# Altium integrated library altium.IntLib: 286 symbols (part 3 of 4)
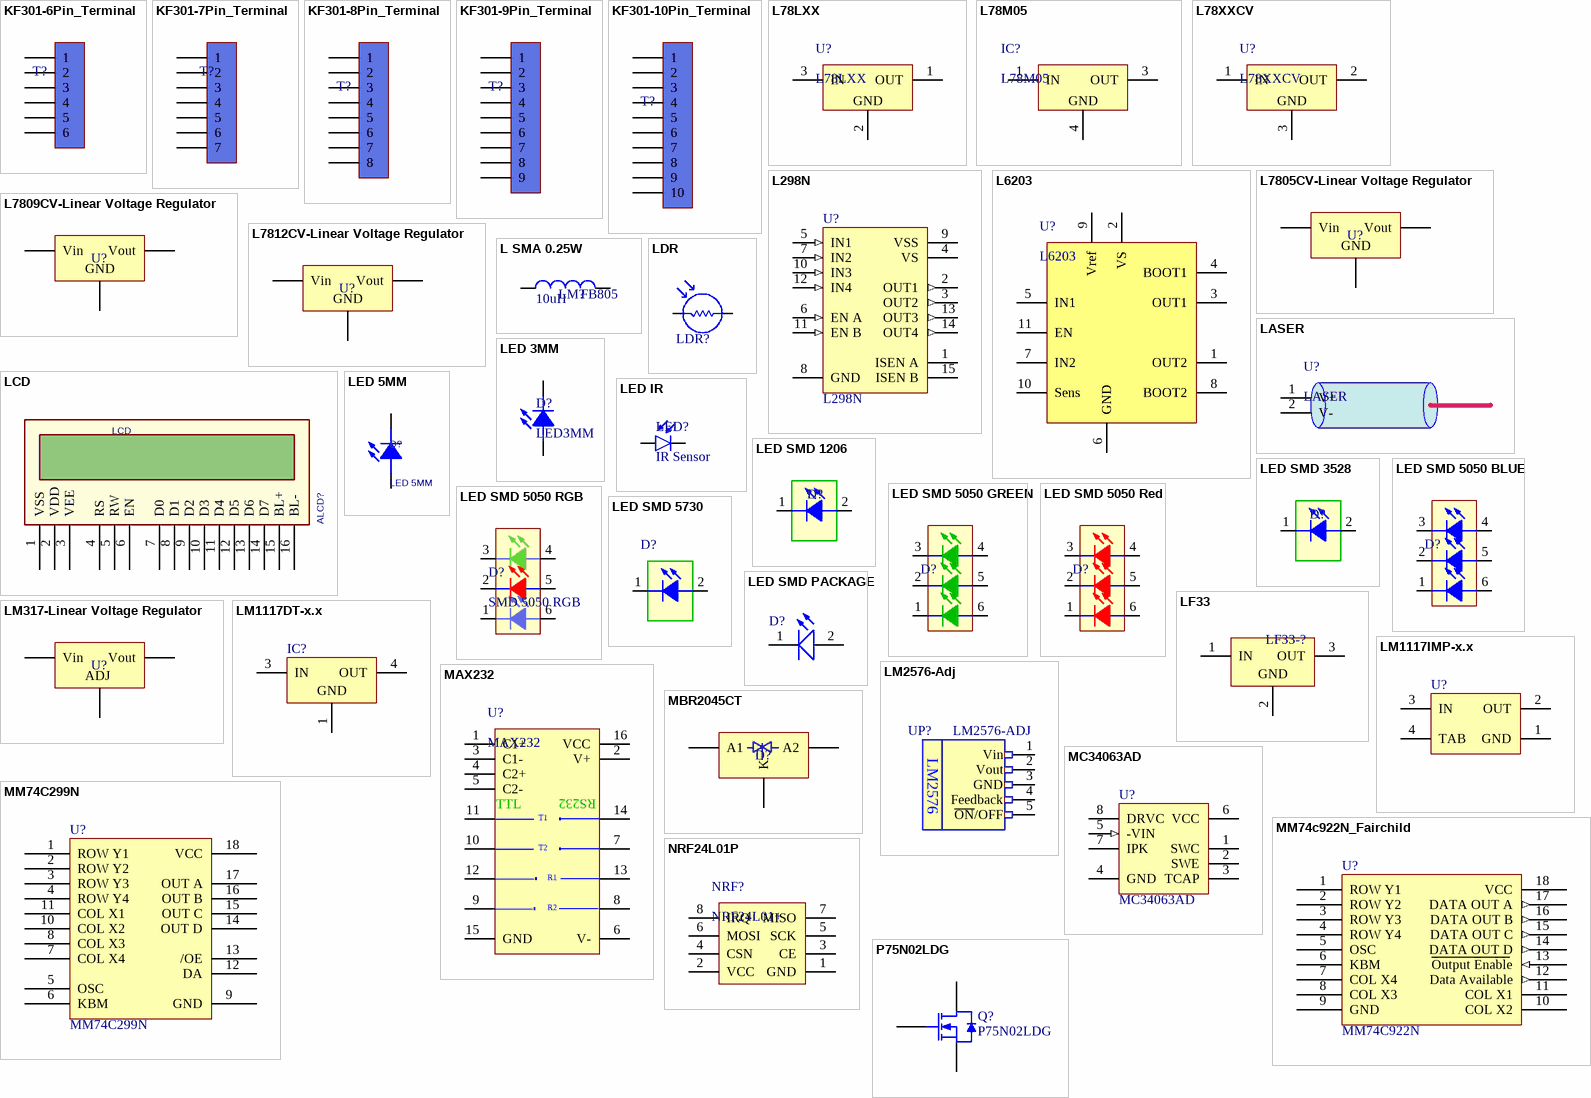
[diagram p9: symbols KF301-6Pin_Terminal to P75N02LDG]

## L78XXCV
designator U?
Fixed Voltage Regulator; Designer: Saeid Jorablo; Company: ControTec; Adding Date: 1387/01/06; Voltage: *
footprint 78XXCV - Right (Right Angle)
footprint 78XXCV
pins: 1 IN, 2 OUT, 3 GND

## L298N
designator U?
Dual Full Bridge Driver; Revision 1: 24-Aug-2001: Footprint Added.; Revision 2: 17-Jul-2002: Re-released for DXP Platform.; Package Information: Latest Revision: Apr-1998; Published: 8-Jun-2000; Datasheet: Latest Revision: Jul-1999; Package Reference: Multiwatt15H; Publisher: Altium Limited
footprint Multiwatt15H (TO, Thru-Hole, Horizontal, Heatsink Mounted; 15 Bent Staggered Leads; Pitch 1.27 mm)
footprint Multiwatt15V (TO, Thru-Hole, Vertical, Heatsink Mounted; 15 Bent Staggered Leads; Pitch 1.27 mm)
pins: 1 ISEN A, 2 OUT1 (out), 3 OUT2 (out), 4 VS (power), 5 IN1 (in), 6 EN A (in), 7 IN2 (in), 8 GND (power), 9 VSS (power), 10 IN3 (in), 11 EN B (in), 12 IN4 (in), 13 OUT3 (out), 14 OUT4 (out), 15 ISEN B

## L6203
designator U?
DMOS FULL BRIDGE DRIVER; Designer: Saeid Jorablo; Company: ControTEK; Adding Date: 1387/01/08
footprint MUlTIWATT11 (Use For L6203)
pins: 1 OUT2, 2 VS, 3 OUT1, 4 BOOT1, 5 IN1, 6 GND, 7 IN2, 8 BOOT2, 9 Vref, 10 Sens, 11 EN

## L7805CV-Linear Voltage Regulator
designator U?, comment L7805CV  (value not drawn)
Linear Voltage Regulator IC Positive FIXED Output 5V 1.5A TO-220AB; Manufacturer: STMicroelectronics; Designer: Abbas Basereh; Link: https://www.aliexpress.com/item/; Link: http://www.tme.eu/en/; Link: http://www.digikey.com/; Part. No: L7805CV
footprint TO-220 AB WITH HEAT SINK (Epoxy meets UL94, V0)
footprint TO-220 AB (Epoxy meets UL94, V0)
footprint TO-220 AB S (Epoxy meets UL94, V0)
footprint TO-220 AB WITH HEAT SINK ASM
footprint TO-220 AB with heatsink ya25 (Epoxy meets UL94, V0-Design:Abbas Basereh)
pins: 1 Vin, 2 GND, 3 Vout

## L7809CV-Linear Voltage Regulator
designator U?, comment L7809CV  (value not drawn)
Linear Voltage Regulator IC Positive FIXED Output 5V 1.5A TO-220AB; Manufacturer: STMicroelectronics; Designer: Abbas Basereh; Link: https://www.aliexpress.com/item/; Link: http://www.tme.eu/en/; Link: http://www.digikey.com/; Part. No: L7809CV
footprint TO-220 AB WITH HEAT SINK (Epoxy meets UL94, V0)
footprint TO-220 AB (Epoxy meets UL94, V0)
footprint TO-220 AB S (Epoxy meets UL94, V0)
footprint TO-220 AB WITH HEAT SINK ASM
footprint TO-220 AB with heatsink ya25 (Epoxy meets UL94, V0-Design:Abbas Basereh)
pins: 1 Vin, 2 GND, 3 Vout

## L7812CV-Linear Voltage Regulator
designator U?, comment L7812CV  (value not drawn)
Linear Voltage Regulator IC Positive FIXED Output 5V 1.5A TO-220AB; Manufacturer: STMicroelectronics; Designer: Abbas Basereh; Link: https://www.aliexpress.com/item/; Link: http://www.tme.eu/en/; Link: http://www.digikey.com/; Part. No: L7812CV
footprint TO-220 AB WITH HEAT SINK (Epoxy meets UL94, V0)
footprint TO-220 AB (Epoxy meets UL94, V0)
footprint TO-220 AB S (Epoxy meets UL94, V0)
footprint TO-220 AB WITH HEAT SINK ASM
footprint TO-220 AB with heatsink ya25 (Epoxy meets UL94, V0-Design:Abbas Basereh)
pins: 1 Vin, 2 GND, 3 Vout

## L SMA 0.25W
designator LM?, comment 10uH  value FB805
Inductor; Code_IEC: 1005; Published: 8-Jun-2000; LatestRevisionDate: 29-May-2009; LatestRevisionNote: IPC-7351 Footprint Added.; PackageReference: 0402-A; Publisher: Altium Limited; PackageDescription: Chip Inductor; Code_JEITA: 0402
footprint 0805L (,0805, 2012, 200X130)
pins: 1, 2

## LASER
designator U?
Designer: Saeid Jorablo; Company: Personal; Project Name: Abtahi; Adding Date: 10/21/2009; Wave Lenght: *; Power: *; Voltage: *
footprint Laser
pins: 1 V+, 2 V-

## LCD
designator ALCD?
Alphanumic LCD; Designer: Abbas Basereh; Data: 16-12-2016
footprint LCD_2X16 (LCD 2x16 Alphanumberic-Designer Abbas Basereh)
footprint LCD_2X16 BLUE10mm (LCD 2x16 Alphanumberic-Designer Abbas Basereh)
footprint LCD_2X16 BLUE - 2.5mm (LCD 2x16 Alphanumberic-Designer Abbas Basereh)
footprint LCD_2X16 GREEN10mm (LCD 2x16 Alphanumberic-Designer Abbas Basereh)
footprint LCD_2X16 GREEN - 2.5mm (LCD 2x16 Alphanumberic-Designer Abbas Basereh)
footprint LCD 16x2 (Character LCD, 2 Row, 16 Colunm)
footprint LCD 20X4 (4 line x 20 characters LCD)
pins: 1 VSS, 2 VDD, 3 VEE, 4 RS, 5 RW, 6 EN, 7 D0, 8 D1, 9 D2, 10 D3, 11 D4, 12 D5, 13 D6, 14 D7, 15 BL+, 16 BL-

## LDR
designator LDR?, comment PhotoCell  (value not drawn)
Photo Cell- Variable Resistor With Light; Company: IPA CO.; Designer: Saeid Jorablo; Last Update Time: 2008/07/17
footprint PhotoCell
pins: 1, 2

## LED 3MM
designator D?, comment LED3MM
Light Emitting Diode; Designer: Ali Hafizi
footprint LED3mm_GRN
footprint LEDRight_Green (LED 3mm Right Angle - Color Green)
footprint LEDRight_Red (LED 3mm Right Angle - Color Red)
footprint LEDRight_Yellow (LED 3mm Right Angle - Color Yellow)
pins: 1 ANODE, 2 CATHODE

## LED 5MM
designator D?
Light Emitting Diode; Designer: Abbas Basereh; Data: 16-12-2016; Link: *; Part.No: *
footprint LED5MM_BLUE (LED 5MM THROUGH HOLE BLUE-Designer Abbas Basereh)
footprint LED5MM_GRN (LED 5MM THROUGH HOLE GREEN-Designer Abbas Basereh)
footprint LED5MM_RED (LED 5MM THROUGH HOLE RED-Designer Abbas Basereh)
footprint LED5MM_YELLOW (LED 5MM THROUGH HOLE YELLOW-Designer Abbas Basereh)
pins: 1 ANODE, 2 CATHODE

## LED IR
designator LED?, comment IR Sensor
Infra Red Reciever Photo Diode; Designer: Saeid Jorablo; Organazation: ControTec; Adding Date: 1387/12/22
footprint LED5mm_IR_Reciver
footprint LED5mm_IR
pins: 1 A, 2 K

## LED SMD 1206
designator D?, comment SMD 1206 LED  (value not drawn)
footprint LED 1206
pins: 1, 2

## LED SMD 3528
designator D?  (value not drawn)
SMD 3528 LED
footprint LED 3528
pins: 1, 2

## LED SMD 5050 BLUE
designator D?, comment probably led colors not mach to real please check the device and change the component  (value not drawn)
SMD 5050 BLUE LED; Designer: Abbas Basereh; Design Date: 1395/11/10; ComponentLink1Description: SMD 5050 BLUE; ComponentLink1URL: http://www.yuanlei-led.com; ComponentLink2Description: Reference; PackageDescription: SMD 5050 BLUE; Publisher: Abbas Basereh; Mounting Technology: Surface Mount; Pin Count: 6; Status: Unreleased; Comment_1: SMD 5050 BLUE
footprint 5050 LED package (DESIGNER ABBAS BASEREH)
pins: 1, 2, 3, 4, 5, 6

## LED SMD 5050 GREEN
designator D?, comment probably led colors not mach to real please check the device and change the component  (value not drawn)
SMD 5050 GREEN LED; Designer: Abbas Basereh; Design Date: 1395/11/10; ComponentLink1Description: SMD 5050 GREEN; ComponentLink1URL: http://www.yuanlei-led.com; ComponentLink2Description: Reference; PackageDescription: SMD 5050 GREEN; Publisher: Abbas Basereh; Mounting Technology: Surface Mount; Pin Count: 6; Status: Unreleased; Comment_1: SMD 5050 GREEN
footprint 5050 LED package (DESIGNER ABBAS BASEREH)
pins: 1, 2, 3, 4, 5, 6

## LED SMD 5050 Red
designator D?, comment probably led colors not mach to real please check the device and change the component  (value not drawn)
SMD 5050 Red LED; Designer: Abbas Basereh; Design Date: 1395/11/10; ComponentLink1Description: SMD 5050 Red; ComponentLink1URL: http://www.yuanlei-led.com; ComponentLink2Description: Reference; PackageDescription: SMD 5050 Red; Publisher: Abbas Basereh; Mounting Technology: Surface Mount; Pin Count: 6; Status: Unreleased; Comment_1: SMD 5050 Red
footprint 5050 LED package (DESIGNER ABBAS BASEREH)
pins: 1, 2, 3, 4, 5, 6

## LED SMD 5050 RGB
designator D?, comment Comment_1: SMD 5050 RGB  (hidden comment: probably led colors not mach to real please check the device and change the component)
SMD 5050 RGB LED; Designer: Abbas Basereh; Design Date: 1395/11/10; ComponentLink1Description: SMD 5050 RGB; ComponentLink1URL: http://www.yuanlei-led.com; ComponentLink2Description: Reference; PackageDescription: SMD 5050 RGB; Publisher: Abbas Basereh; Mounting Technology: Surface Mount; HelpURL: probably color of the leds not mached real please check and change; Pin Count: 6; Status: Unreleased
footprint 5050 LED package (DESIGNER ABBAS BASEREH)
pins: 1, 2, 3, 4, 5, 6

## LED SMD 5730
designator D?, comment 0.5WATT WITHE/WARM  (value not drawn)
LED SMD 0.5WATT; Designer: Abbas Basereh; Comment_1: POWER LED SMD 0.5W; Design Date: 1395/11/14; ComponentLink1Description: POWER LED SMD LIGHTING; ComponentLink1URL: http://www.epistar.com.tw/_english/10_technology/00_detail.php?TID=3; ComponentLink2Description: Reference; PackageDescription: SMD; Publisher: Abbas Basereh; Mounting Technology: Surface Mount; Pin Count: 2; Status: Unreleased; VALUE: 0.5WATT WITHE/WARM
footprint LED-5730 (LED; 2 Leads)
pins: 1, 2

## LED SMD PACKAGE
designator D?
SMD Mono-color Chip LED Waterclear; Part Number: 150080BS75000; Peak Wavelength: 465 nm; Forward Voltage: 3.2 V; Published Date: Jan 2017; Publisher: Ali Hafizi
footprint LED_SMD_0603 (SMD Mono-color Chip LED, body 1.6x0.8mm)
footprint LED_SMD_0805 (SMD Mono-color Chip LED, body 2.0x1.25mm)
footprint LED_SMD_1206 (SMD Mono-color Chip LED, body 3.2x1.6mm)
pins: 1 K, 2 A

## LF33
designator LF33-?, comment Voltage Regulator  (value not drawn)
Voltage Regulator 3.3 Volt
footprint LF33 (Voltage Regulator 3.3)
pins: 1 IN, 2 GND, 3 OUT

## LM317-Linear Voltage Regulator
designator U?, comment LM317  (value not drawn)
Linear Voltage Regulator IC Positive Adjustable Output 1.2 V ~ 37 V 1.5A TO-220AB; Manufacturer: STMicroelectronics; Part. No: LM317T; Designer: Abbas Basereh; Link: https://www.aliexpress.com/item/10pcs-LM317T-LM317-1-5A-Adj-Voltage-Reg-IC-TO-220/32346665410.html?spm=2114.01010208.3.1.kAAILy&ws_ab_test=searchweb0_0,searchweb201602_4_10065_10068_10084_10083_10080_10082_10081_10060_10061_10062_10056_10055_10054_10059_10099_10078_10079_427_10073_10103_10102_10096_10052_10050_10051,searchweb201603_4&btsid=df845f6f-cd6f-40ae-85f4-c652e8570ab0; Link: http://www.tme.eu/en/details/lm317t/regulated-voltage-regulators/st-microelectronics/; Link: http://www.digikey.com/product-detail/en/stmicroelectronics/LM317T/497-1575-5-ND/591677
footprint TO-220 AB WITH HEAT SINK (Epoxy meets UL94, V0)
footprint TO-220 AB (Epoxy meets UL94, V0)
footprint TO-220 AB S (Epoxy meets UL94, V0)
footprint TO-220 AB WITH HEAT SINK ASM
footprint TO-220 AB with heatsink ya25 (Epoxy meets UL94, V0-Design:Abbas Basereh)
pins: 1 ADJ, 2 Vout, 3 Vin

## LM1117DT-x.x
designator IC?
x.x Volt, 800mA Low-Dropout Linear Regulator, 3-pin TO-252; PartNumber: LM1117DT-3.3; Manufacturer: National Semiconductor; PackageTopMarking: NSUZXYTT*LM1117*DT-X.X; PowerWise: N; CompType: LDO IC; DatasheetVersion: Apr-2006; PackageVersion: revD, Feb-2009; PackageReference: TD03B; PackageDescription: TO252, Molded, Jedec, 6.8 x 6.10 x 2.30mm Body, 3 Lead, 2.28mm Pitch, Surface Mount; Supplier 1: Farnell; Supplier 2: Farnell; RoHS: N; PinCount: 3; Code_JEDEC: TO-252-AA; ComponentLink1Description: LM1117 Datasheet; ComponentLink1URL: http://www.national.com/ds/LM/LM1117.pdf; ComponentLink2Description: LM1117 Web Page; ComponentLink2URL: http://www.national.com/pf/LM/LM1117.html; ComponentLink3Description: TD03B Package Page; ComponentLink3URL: http://www.national.com/packaging/folders/td03b.html
footprint TD03B_N (D-PAK, 4-Leads, Body 6.1x6.6mm, Pitch 2.29mm, Lead Span 9.7mm, IPC Medium Density)
footprint TD03B_L (D-PAK, 4-Leads, Body 6.1x6.6mm, Pitch 2.29mm, Lead Span 9.7mm, IPC High Density)
footprint TD03B_M (D-PAK, 4-Leads, Body 6.1x6.6mm, Pitch 2.29mm, Lead Span 9.7mm, IPC Low Density)
pins: 1 GND (power), 3 IN (power), 4 OUT (power)

## LM1117IMP-x.x
designator U?
x.x Volt, 800mA Low-Dropout Linear Regulator, 4-pin SOT-223; PartNumber: LM1117IMP-3.3; Manufacturer: National Semiconductor; PackageTopMarking: XYTT*N05B; PowerWise: N; CompType: LDO IC; Published: 4-Dec-2008; DatasheetVersion: Apr-2006; PackageVersion: revB, Apr-2003; PackageReference: MP04A; Publisher: Altium Limited; PackageDescription: Molded SOT-223, 6.50 x 3.56 x 1.6mm Body, 4 Lead, 2.3mm Pitch; Supplier 1: Farnell; Supplier Part Number 1: 7614123; RoHS: N; PinCount: 4; Code_JEDEC: TO-261-AA; Code_IPC: SOT223-4; ComponentLink1Description: LM1117 Datasheet; ComponentLink1URL: http://www.national.com/ds/LM/LM1117.pdf; ComponentLink2Description: LM1117 Web Page; ComponentLink2URL: http://www.national.com/pf/LM/LM1117.html; ComponentLink3Description: MP04A Package Page; ComponentLink3URL: http://www.national.com/packaging/folders/mp04a.html
footprint SOT223_N (SOT223, 4-Leads, Body 6.5x3.5mm, Pitch 2.3mm, Lead Span 7mm, IPC Medium Density)
footprint SOT223_L (SOT223, 4-Leads, Body 6.5x3.5mm, Pitch 2.3mm, Lead Span 7mm, IPC High Density)
footprint SOT223_M (SOT223, 4-Leads, Body 6.5x3.5mm, Pitch 2.3mm, Lead Span 7mm, IPC Low Density)
pins: 1 GND (power), 2 OUT (power), 3 IN (power), 4 TAB (power)

## LM2576-Adj
designator UP?, comment LM2576-ADJ
1.2-50V, 3A variable output step-down switching voltage regulator; Designer: Abbas Basereh; Data: 16-12-2016; Link: *; Part.No: *; VALUE: LM2576-ADJ
footprint TO-220_5 with heatsink (TO-220 STRAIGHT, T05A pitch: 1.7mm-Designer Abbas Basereh)
footprint TO-220_5 with heatsink HS sot32 (TO-220 STRAIGHT, T05A pitch: 1.7mm-Designer Abbas Basereh)
footprint TO-220_5 (TO-220 STRAIGHT, T05A pitch: 1.7mm-Designer Abbas Basereh)
footprint TO-220_5 - with heatsink ya25 (TO-220 STRAIGHT, T05A pitch: 1.7mm-Designer Abbas Basereh)
footprint LM2576 SMD
pins: 1 Vin (power), 2 Vout (power), 3 GND (power), 4 Feedback, 5 ~{ON}/OFF
text: LM2576

## MAX232
designator U?
+5V Powered, Multi-Channel RS-232 Driver/Receiver; ComponentAuthor: Saeid Jorablo; ComponentLink1Description: Datasheet; ComponentLink1URL: http://pdfserv.maxim-ic.com/en/ds/MAX220-MAX249.pdf
footprint DIP16
footprint SO16 (SOIC, 16-Leads, Body 9.9x3.9mm, Pitch 1.27mm, IPC Medium Density)
footprint NSO16_L (SOIC, 16-Leads, Body 9.9x3.9mm, Pitch 1.27mm, IPC High Density)
footprint NSO16_M (SOIC, 16-Leads, Body 9.9x3.9mm, Pitch 1.27mm, IPC Low Density)
footprint NSO16_N (SOIC, 16-Leads, Body 9.9x3.9mm, Pitch 1.27mm, IPC Medium Density)
pins: 1 C1+, 2 V+, 3 C1-, 4 C2+, 5 C2-, 6 V-, 7 T2OUT, 8 R2IN, 9 R2OUT, 10 T2IN, 11 T1IN, 12 R1OUT, 13 R1IN, 14 T1OUT, 15 GND (power), 16 VCC (power)
text: TTL; RS232; T1; T2; R1; R2

## MBR2045CT
designator D?, comment MBR2045  (value not drawn)
Power Schottky; Manufacturer: VISHAY; Part. No: MBR2045CT-E3/45; Designer: Abbas Basereh; Link: https://www.aliexpress.com/item/100PCS-MBR2045CT-MBR2045-MBR2045C-TO220/32576607386.html?spm=2114.01010208.3.1.vWJGYC&ws_ab_test=searchweb0_0,searchweb201602_4_10065_10068_10084_10083_10080_10082_10081_10060_10061_10062_10056_10055_10054_10059_10099_10078_10079_427_10073_10103_10102_10096_10052_10050_10051,searchweb201603_4&btsid=59d3c580-949c-4e8a-9059-0fcae782ffc8; Link: http://www.tme.eu/en/details/mbr2045ct-e3_45/tht-universal-diodes/vishay/; Link: http://www.digikey.com/product-detail/en/diodes-incorporated/MBR2045CTF-G1/MBR2045CTF-G1DI-ND/5453096
footprint TO-220 AB (Epoxy meets UL94, V0)
footprint TO-220 AB S (Epoxy meets UL94, V0)
footprint TO-220 AB WITH HEAT SINK (Epoxy meets UL94, V0)
footprint TO-220 AB WITH HEAT SINK ASM
footprint TO-220 AB with heatsink ya25 (Epoxy meets UL94, V0-Design:Abbas Basereh)
pins: 1 A1 (power), 2 K (power), 3 A2 (power)

## MC34063AD
designator U?
DC-to-DC Converter Control Circuit; Published: 2017-3-1; LatestRevisionDate: 2017-3-1; LatestRevisionNote: IPC-7351 Footprint Added.; DatasheetVersion: 2017; PackageReference: 751-02; Publisher: ABBAS BASEREH; PackageDescription: 8-Pin Small Outline Integrated Circuit 1.27 mm Pitch; Code_JEDEC: MS-012-AA; Code_IPC: SOIC127P600-8; ComponentLink1Description: Manufacturer Link; ComponentLink1URL: http://www.onsemi.com/site/products/taxonomy/0,4438,503,00.html; ComponentLink2Description: Datasheet; ComponentLink2URL: http://www.onsemi.com/pub/Collateral/MC34063A-D.PDF
footprint 751-02_N (SOIC, 8-Leads, Body 4.9x3.9mm, Pitch 1.27mm, IPC Medium Density)
footprint 751-02_L (SOIC, 8-Leads, Body 4.9x3.9mm, Pitch 1.27mm, IPC High Density)
footprint 751-02_M (SOIC, 8-Leads, Body 4.9x3.9mm, Pitch 1.27mm, IPC Low Density)
pins: 1 SWC (oc), 2 SWE (oe), 3 TCAP, 4 GND (power), 5 -VIN (in), 6 VCC (power), 7 IPK, 8 DRVC (oc)

## MM74C299N
designator U?
16-Key Encoder
footprint DIP18
pins: 1 ROW Y1, 2 ROW Y2, 3 ROW Y3, 4 ROW Y4, 5 OSC, 6 KBM, 7 COL X4, 8 COL X3, 9 GND (power), 10 COL X2, 11 COL X1, 12 DA, 13 /OE, 14 OUT D, 15 OUT C, 16 OUT B, 17 OUT A, 18 VCC (power)

## MM74c922N_Fairchild
designator U?, comment MM74C922N
16-Key Encoder
footprint DIP18
pins: 1 ROW Y1, 2 ROW Y2, 3 ROW Y3, 4 ROW Y4, 5 OSC, 6 KBM, 7 COL X4, 8 COL X3, 9 GND (power), 10 COL X2, 11 COL X1, 12 Data Available (out), 13 Output Enable (in), 14 DATA OUT D (out), 15 DATA OUT C (out), 16 DATA OUT B (out), 17 DATA OUT A (out), 18 VCC (power)

## NRF24L01P
designator NRF?, comment NRF24L01+
RF Module; Ali Hafizi: Creature
footprint NRF24L01P (NRFL01+ Module)
pins: 1 GND, 2 VCC, 3 CE, 4 CSN, 5 SCK, 6 MOSI, 7 MISO, 8 IRQ

## P75N02LDG
designator Q?
N-channel MOSFET; Note: Pin 2 is trimmed (and not drawn) and is electrically connected to Drain; Published: 2017-1-12; DatasheetVersion: 2017-1-12; PackageVersion: 2017-1-12; PackageReference: D-PAK TO-252; Publisher: Abbas Basereh; PackageDescription: D-PAK TO-252; ComponentLink1Description: Manufacturer Link; ComponentLink2Description: Datasheet; ComponentLink2URL: http://www.roboeq.ir/files/id/2793/name/p75n02ldg.pdf/
footprint TO252-3L (D-PAK, 3-Pads, Body 6.2x6.7mm (max), IPC High Density)
footprint TO252-3M (D-PAK, 3-Pads, Body 6.2x6.7mm (max), IPC Low Density)
footprint TO252-3N (D-PAK, 3-Pads, Body 6.2x6.7mm (max), IPC Medium Density)
pins: 1 G, 3 S, 4 D

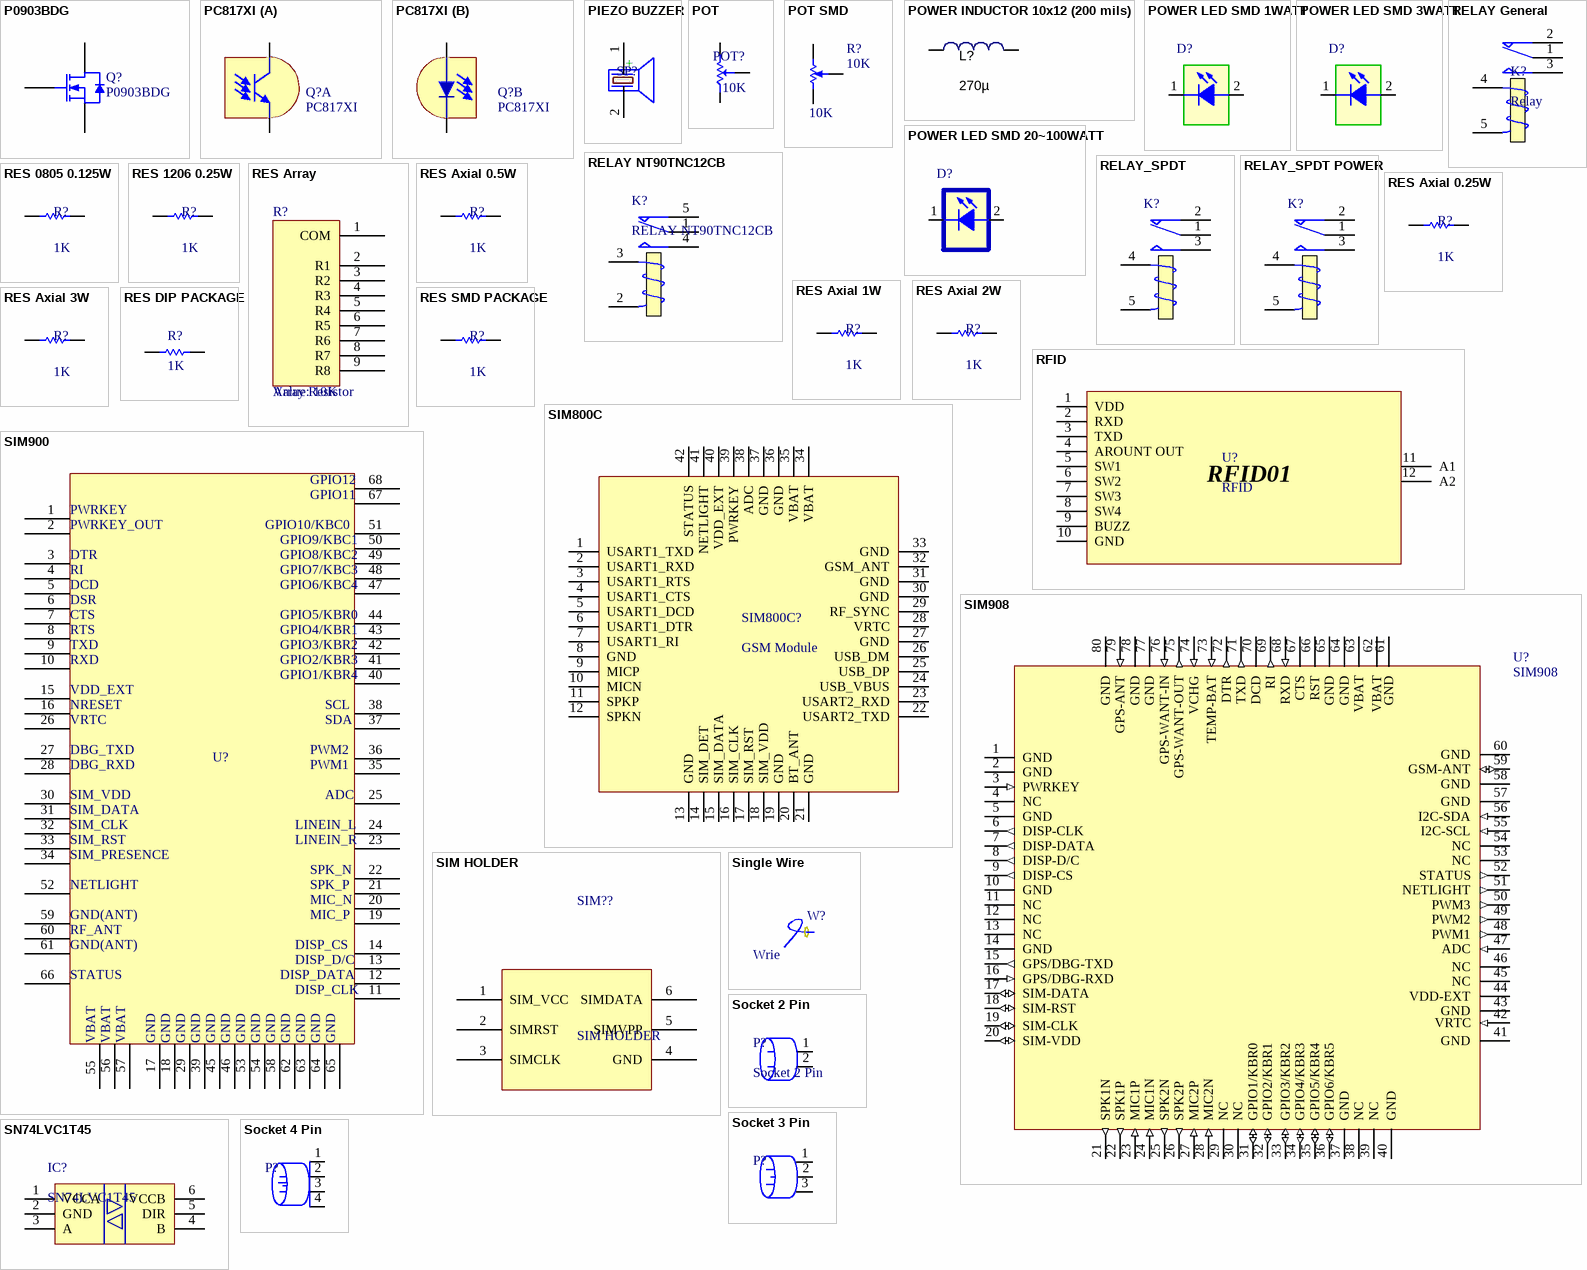
[diagram p6: symbols P0903BDG to Socket 4 Pin]

## P0903BDG
designator Q?
N-channel MOSFET; Note: Pin 2 is trimmed (and not drawn) and is electrically connected to Drain; Published: 2017-1-12; DatasheetVersion: 2017-1-12; PackageVersion: 2017-1-12; PackageReference: D-PAK TO-252; Publisher: Abbas Basereh; PackageDescription: D-PAK TO-252; ComponentLink1Description: Manufacturer Link; ComponentLink2Description: Datasheet; ComponentLink2URL: http://www.roboeq.ir/files/id/2909/name/P0903BDG.pdf/
footprint TO252-3L (D-PAK, 3-Pads, Body 6.2x6.7mm (max), IPC High Density)
footprint TO252-3M (D-PAK, 3-Pads, Body 6.2x6.7mm (max), IPC Low Density)
footprint TO252-3N (D-PAK, 3-Pads, Body 6.2x6.7mm (max), IPC Medium Density)
pins: 1 G, 3 S, 4 D

## PC817XI
designator Q?
DIP 4pin General Purpose  Photocoupler; Published: 2017-2-27; DatasheetVersion: 2017-2-27; PackageVersion: 2017-2-27; PackageReference: SMT Gullwing Lead-Form; Publisher: Abbas Basereh; PackageDescription: SOP, 4-Leads, Body 4/65x6/75mm, Pitch 2/54mm, IPC Medium Density designer:abbas basereh; ComponentLink1Description: Manufacturer Link; ComponentLink1URL: http://www.roboeq.ir/files/id/233/name/PC817.pdf/; ComponentLink2Description: DIP 4pin General Purpose
footprint SMT Gullwing Lead-Form (SOP, 4-Leads, Body 4/65x6/75mm, Pitch 2/54mm, IPC Medium Density designer:abbas basereh)
part A pins: 3 E, 4 C
part B pins: 1 A, 2 K

## PIEZO BUZZER
designator SP?
PIEZO BUZZER ACTIVE; Designer: Abbas Basereh; Comment_1: SPEAKER AND BEEP; Design Date: 1395/11/14; ComponentLink2Description: Reference; PackageDescription: THD; Publisher: Abbas Basereh; Mounting Technology: THD; Pin Count: 2; Status: Unreleased
footprint BUZZER 7.62mm DC (BUZZER 12mm DIA , 7.62mm pitch DESIGNER ABBAS BASEREH)
pins: 1 +, 2 -

## POT
designator POT?, comment 10K
Variable Resistor; Value: 10K
footprint POT 4 (Trimmer)
footprint POT 2 (Trimmer)
footprint POT (Voloume)
footprint POT 1 (Trimmer)
footprint POT 3 (Volume Right)
pins: 1 CCW, 2 CW, 3 SetPoint

## POT SMD
designator R?, comment 10K
Square Trimming Potentiometer; Published: 17-Dec-2003; DatasheetVersion: Oct-2003; PackageReference: POT4MM-2; Publisher: Altium Limited; PackageDescription: Square Trimming Potentiometer; ComponentLink1Description: Manufacturer Link; ComponentLink1URL: http://bourns.com/2/search.html; Value: 10K
footprint POT4MM-Small Pot (Square Trimming Potentiometer)
footprint POT4MM-Triming (Square Trimming Potentiometer)
pins: CCW -, CW +, W
1 alternate drawing of the same symbol

## POWER INDUCTOR 10x12 (200 mils)
designator L?, comment 270µ
POWER INDUCTOR 10x12 (200 mils); Tolerance: ±20%; Type: Ferrite Core; SCDType: source; Package / Case: POWER INDUCTOR 10x12 (200 mils); Supplier 1: Digi-Key; Operating Temperature: -40°C ~ 125°C; Value: 270µ; PUBLISHER: ABBAS BASEREH  2017-3-1
footprint Inductor 10x12 (200 mils) (POWER INDUCTOR 10x12 (200 mils) DESIGNER ABBAS BASEREH)
pins: 1, 2

## POWER LED SMD 1WATT
designator D?, comment 1WATT WITHE/WARM  (value not drawn)
POWER LED SMD 1WATT; Designer: Abbas Basereh; Design Date: 1395/11/14; ComponentLink1Description: POWER LED SMD LIGHTING; ComponentLink1URL: http://www.epistar.com.tw/_english/10_technology/00_detail.php?TID=3; ComponentLink2Description: Reference; PackageDescription: SMD; Publisher: Abbas Basereh; Mounting Technology: Surface Mount; Pin Count: 2; Status: Unreleased; Comment_1: POWER LED SMD 1W; VALUE: 1WATT WITHE/WARM
footprint POWER LED 1WATT (DESIGNER : ABBAS BASEREH)
footprint POWER LED 1WATT-WITH LENS (DESIGNER : ABBAS BASEREH)
pins: 1, 2

## POWER LED SMD 3WATT
designator D?, comment 3WATT WITHE/WARM  (value not drawn)
POWER LED SMD 3WATT; Designer: Abbas Basereh; Design Date: 1395/11/14; ComponentLink1Description: POWER LED SMD LIGHTING; ComponentLink1URL: http://www.epistar.com.tw/_english/10_technology/00_detail.php?TID=3; ComponentLink2Description: Reference; PackageDescription: SMD; Publisher: Abbas Basereh; Mounting Technology: Surface Mount; Pin Count: 2; Status: Unreleased; Comment_1: POWER LED SMD 3W; VALUE: 3WATT WITHE/WARM
footprint POWER LED 3WATT (DESIGNER : ABBAS BASEREH)
footprint POWER LED 3WATT-WITH LENS (DESIGNER : ABBAS BASEREH)
pins: 1, 2

## POWER LED SMD 20~100WATT
designator D?, comment 20~100WATT WITHE/WARM  (value not drawn)
POWER LED SMD; Designer: Abbas Basereh; Design Date: 1395/11/14; ComponentLink1Description: POWER LED SMD LIGHTING; ComponentLink1URL: http://www.epistar.com.tw/_english/10_technology/00_detail.php?TID=3; ComponentLink2Description: Reference; PackageDescription: THD/SMD; Publisher: Abbas Basereh; Mounting Technology: Surface Mount; Pin Count: 2; Status: Unreleased; Comment_1: POWER LED SMD; VALUE: 20~100WATT WITHE/WARM
footprint POWER LED 20~100W (DESIGNER ABBAS BASEREH)
pins: 1, 2

## RELAY General
designator K?, comment Relay
Relay_SPDT POWER NEEDLE; Designer: Ali Hafizi; Company: E.P.I.L; Design_Date: 2011/10/31
footprint Relay 15.40x12.10x13.10
footprint Relay 18.85x15.35x15.70
pins: 1 COM, 2 NC, 3 NO, 4 T1, 5 T2

## RELAY NT90TNC12CB
designator K?
Relay_SPDT POWER NEEDLE; Designer: Abbas Basereh; PackageDescription: 31.7x26.7x28; PackageReference: RELAY NT90TNC12CB; Mounting Technology: Through-Hole; Value: RELAY NT90TNC12CB; ComponentLink1Description: Datasheet; Pin Count: 0; Update Date: 2017-3-4; Category: NT90TNC12CB
footprint RELAY NT90TNC12CB (31.7x26.7x28 DESIGNER:ABBAS BASEREH)
pins: 1 COM, 2 T2, 3 T1, 4 NO, 5 NC

## RELAY_SPDT
designator K?
Single-Pole Dual-Throw Relay; Designer: Abbas Basereh; Mounting Technology: Through-Hole; ComponentLink1Description: Datasheet; Pin Count: 0; Update Date: 2017-3-1
footprint Relay 18.85x15.35x15.70
pins: 1 COM, 2 NC, 3 NO, 4 T1, 5 T2

## RELAY_SPDT POWER
designator K?
Relay_SPDT POWER NEEDLE; Designer: Abbas Basereh; Mounting Technology: Through-Hole; ComponentLink1Description: Datasheet; Pin Count: 0; Update Date: 2017-3-1
footprint Relay Needle 31.7x26.7x28 (DESIGNER ABBAS BASEREH)
pins: 1 COM, 2 NC, 3 NO, 4 T1, 5 T2

## RES 0805 0.125W
designator R?, comment 1K
RES 0805; Designer: Abbas Basereh; Desc.: RES SMD 0805; Data: 16-12-2016
footprint RESC3413X04N (Chip Resistor, 2-Leads, Body 3/40x1/30mm, IPC Medium Density)
pins: 1, 2

## RES 1206 0.25W
designator R?, comment 1K
RES 1206; Designer: Abbas Basereh; Desc.: RES SMD 1206; Data: 16-12-2016
footprint RESC4817X04N (Chip Resistor, 2-Leads, Body 4/80x1/70mm, IPC Medium Density)
pins: 1, 2

## RES Array
designator R?, comment Array Resistor  value 10K
Resistor Pack
footprint Res Array
pins: 1 COM, 2 R1, 3 R2, 4 R3, 5 R4, 6 R5, 7 R6, 8 R7, 9 R8

## RES Axial 0.5W
designator R?, comment 1K
RES Axial 0.5W; Designer: Abbas Basereh; Desc.: RES Axial 0.5W; Data: 4-1-2017
footprint Axial 0_5W 5_0mm (Designer Abbas Basereh)
pins: 1, 2

## RES Axial 0.25W
designator R?, comment 1K
RES Axial 0.25W; Designer: Abbas Basereh; Desc.: RES Axial 0.25W; Data: 4-1-2017
footprint Axial 0_25w_2_54mm (Designer Abbas Basereh)
footprint Axial 0_25 W, 0_4 IN LEAD PITCH (Designer Abbas Basereh)
pins: 1, 2

## RES Axial 1W
designator R?, comment 1K
RES Axial 1W; Designer: Abbas Basereh; Desc.: RES Axial 1W; Data: 4-1-2017
footprint Axial 1W  7_0mm (Designer Abbas Basereh)
pins: 1, 2

## RES Axial 2W
designator R?, comment 1K
RES Axial 2W; Designer: Abbas Basereh; Desc.: RES Axial 2W; Data: 4-1-2017
footprint Axial 2W 8_0mm (Designer Abbas Basereh)
pins: 1, 2

## RES Axial 3W
designator R?, comment 1K
RES Axial 3W; Designer: Abbas Basereh; Desc.: RES Axial 3W; Data: 4-1-2017
footprint Axial 3W 9_0mm (Designer Abbas Basereh)
pins: 1, 2

## RES DIP PACKAGE
designator R?, comment 1K
TOTAL DIP RESISTOR PACK; Designer: Ali Hafizi
footprint RES-(1/1)
footprint RES-(1/2)
footprint RES-(1/2)-Stand
footprint RES-(1/4)
footprint RES-(1/4)-Stand
footprint RES-(1/8)
footprint RES-(2/1)
footprint RES-(5/1)-Stand
pins: 1, 2

## RES SMD PACKAGE
designator R?, comment 1K
TOTAL SMD RESISTOR PACK; Designer: Abbas Basereh; Desc.: RES SMD PAKAGES; Data: 2017-3-10
footprint RES0201 (Chip Resistor, 2-Leads, Body 0/60x0/30mm, IPC Medium Density DESIGNER:ABBAS BASEREH)
footprint RES0402 (Chip Resistor, 2-Leads, Body 1/00x0/50mm, IPC Medium Density DESIGNER:ABBAS BASEREH)
footprint RES0603 (Chip Resistor, 2-Leads, Body 1/60x0/80mm, IPC Medium Density DESIGNER:ABBAS BASEREH)
footprint RES0805 (Chip Resistor, 2-Leads, Body 2/00x1/25mm, IPC Medium Density DESIGNER:ABBAS BASEREH)
footprint RES1206 (Chip Resistor, 2-Leads, Body 3/20x1/60mm, IPC Medium Density DESIGNER:ABBAS BASEREH)
footprint RES1210 (Chip Resistor, 2-Leads, Body 3/20x2/50mm, IPC Medium Density DESIGNER:ABBAS BASEREH)
footprint RES1812 (Chip Resistor, 2-Leads, Body 4/50x3/20mm, IPC Medium Density DESIGNER:ABBAS BASEREH)
footprint RES2010 (Chip Resistor, 2-Leads, Body 5/00x2/50mm, IPC Medium Density DESIGNER:ABBAS BASEREH)
footprint RES2512 (Chip Resistor, 2-Leads, Body 6/40x3/20mm, IPC Medium Density DESIGNER:ABBAS BASEREH)
footprint RES0201_(0603X03L) (Chip Resistor, 2-Leads, Body 0.6x0.3mm, IPC High Density (0.05 W))
footprint RES0402_(1005X04L) (Chip Resistor, 2-Leads, Body 1.0x0.5mm, IPC High Density _ (0.031/0.063 W))
footprint RES0603_(1608X06L) (Chip Resistor, 2-Leads, Body 1.6x0.8mm, IPC High Density _ (0.063W))
footprint RES0805_(2012X06L) (Chip Resistor, 2-Leads, Body 2.0x1.3mm, IPC High Density _ (0.100 W))
footprint RES1206 _(3216X08L) (Chip Resistor, 2-Leads, Body 3.2x1.6mm, IPC High Density _ (0.125 W))
footprint RES1210_(3226X07L) (Chip Resistor, 2-Leads, Body 3.2x2.6mm, IPC High Density _ (0.250 W))
footprint RES1217_(3042X09L) (Chip Resistor, 2-Leads, Body 3.0x4.2mm, IPC High Density _ (0.250 W))
footprint RES2010_(5026X08L) (Chip Resistor, 2-Leads, Body 5.0x2.6mm, IPC High Density _ (0.250 W))
footprint RES2020_(5151X09L) (Chip Resistor, 2-Leads, Body 5.1x5.1mm, IPC High Density _ (0.5 W))
footprint RES2045_(50115X09L) (Chip Resistor, 2-Leads, Body 5.0x11.5mm, IPC High Density _ (1.0 W))
footprint RES2512_(6331X07L) (Chip Resistor, 2-Leads, Body 6.3x3.1mm, IPC High Density _ (0.500 W))
pins: 1, 2

## RFID
designator U?
footprint RFID (RFID 2&10 PIN)
pins: 1 VDD, 2 RXD, 3 TXD, 4 AROUNT OUT, 5 SW1, 6 SW2, 7 SW3, 8 SW4, 9 BUZZ, 10 GND, 11 A1, 12 A2
text: RFID01

## SIM800C
designator SIM800C?, comment GSM Module
Designer: Ali Hafizi
footprint SIM800C
pins: 1 USART1_TXD, 2 USART1_RXD, 3 USART1_RTS, 4 USART1_CTS, 5 USART1_DCD, 6 USART1_DTR, 7 USART1_RI, 8 GND, 9 MICP, 10 MICN, 11 SPKP, 12 SPKN, 13 GND, 14 SIM_DET, 15 SIM_DATA, 16 SIM_CLK, 17 SIM_RST, 18 SIM_VDD, 19 GND, 20 BT_ANT, 21 GND, 22 USART2_TXD, 23 USART2_RXD, 24 USB_VBUS, 25 USB_DP, 26 USB_DM, 27 GND, 28 VRTC, 29 RF_SYNC, 30 GND, 31 GND, 32 GSM_ANT, 33 GND, 34 VBAT, 35 VBAT, 36 GND, 37 GND, 38 ADC, 39 PWRKEY, 40 VDD_EXT, 41 NETLIGHT, 42 STATUS

## SIM900
designator U?, comment GSM Module  (value not drawn)
Published: Bastam Beyrami
footprint Sim900
pins: 1, 2, 3, 4, 5, 6, 7, 8, 9, 10, 11, 12, 13, 14, 15, 16, 17, 18, 19, 20, 21, 22, 23, 24, 25, 26, 27, 28, 29, 30, 31, 32, 33, 34, 35, 36, 37, 38, 39, 40, 41, 42, 43, 44, 45, 46, 47, 48, 49, 50, 51, 52, 53, 54, 55, 56, 57, 58, 59, 60, 61, 62, 63, 64, 65, 66, 67, 68
text: GPIO12; GPIO11; PWRKEY; PWRKEY_OUT; GPIO10/KBC0; GPIO9/KBC1; DTR; GPIO8/KBC2; RI; GPIO7/KBC3; DCD; GPIO6/KBC4; DSR; CTS; GPIO5/KBR0; RTS; GPIO4/KBR1; TXD; GPIO3/KBR2; RXD; GPIO2/KBR3; GPIO1/KBR4; VDD_EXT; NRESET; SCL; VRTC; SDA; DBG_TXD; PWM2; DBG_RXD; PWM1; SIM_VDD; ADC; SIM_DATA; SIM_CLK; LINEIN_L; SIM_RST; LINEIN_R; SIM_PRESENCE; SPK_N; NETLIGHT; SPK_P; MIC_N; GND(ANT); MIC_P; RF_ANT; DISP_CS; DISP_D/C; STATUS; DISP_DATA; DISP_CLK; VBAT; GND

## SIM908
designator U?
GSM Module; Publisher: Bastam Beyrami
footprint SIM908 (Simcom SIM908)
pins: 1 GND (power), 2 GND (power), 3 PWRKEY (in), 4 NC, 5 GND (power), 6 DISP-CLK (out), 7 DISP-DATA (out), 8 DISP-D/C (out), 9 DISP-CS (out), 10 GND (power), 11 NC, 12 NC, 13 NC, 14 GND (power), 15 GPS/DBG-TXD (out), 16 GPS/DBG-RXD (in), 17 SIM-DATA (io), 18 SIM-RST (io), 19 SIM-CLK (io), 20 SIM-VDD (io), 21 SPK1N (out), 22 SPK1P (out), 23 MIC1P (in), 24 MIC1N (in), 25 SPK2N (out), 26 SPK2P (out), 27 MIC2P (in), 28 MIC2N (in), 29 NC, 30 NC, 31 GPIO1/KBR0 (io), 32 GPIO2/KBR1 (io), 33 GPIO3/KBR2 (io), 34 GPIO4/KBR3 (io), 35 GPIO5/KBR4 (io), 36 GPIO6/KBR5 (io), 37 GND (power), 38 NC, 39 NC, 40 GND, 41 GND (power), 42 VRTC (in), 43 GND (power), 44 VDD-EXT (power), 45 NC, 46 NC, 47 ADC (in), 48 PWM1 (out), 49 PWM2 (out), 50 PWM3 (out), 51 NETLIGHT (out), 52 STATUS (out), 53 NC, 54 NC, 55 I2C-SCL (in), 56 I2C-SDA (in), 57 GND (power), 58 GND (power), 59 GSM-ANT (io), 60 GND (power), 61 GND (power), 62 VBAT (power), 63 VBAT (power), 64 GND (power), 65 GND (power), 66 RST (power), 67 CTS (power), 68 RXD (in), 69 RI (out), 70 DCD (hiz), 71 TXD (out), 72 DTR (out), 73 TEMP-BAT (in), 74 VCHG (in), 75 GPS-WANT-OUT (out), 76 GPS-WANT-IN (in), 77 GND (power), 78 GND (power), 79 GPS-ANT (in), 80 GND (power)

## SIM HOLDER
designator SIM??
Deigner: Ali Hafizi
footprint SIM HOLDER 6
pins: 1 SIM_VCC, 2 SIMRST, 3 SIMCLK, 4 GND, 5 SIMVPP, 6 SIMDATA

## Single Wire
designator W?  Diameter: Wrie  (hidden comment: *)
A Customize Component For Single Wire Connection; Designer: Saeid Jorablo; Company: IPA Co; Adding Date: 1388/04/05; Color: Blue; Wire Name: *
footprint wire 1.5 mm
footprint wire 2.0 mm
pins: 1

## SN74LVC1T45
designator IC?
Single-BIT Dual-Supply bus Transiver; Company: MY; Selling Source: Iranmicro.ir; Design Date: 12/02/2011
footprint TSOP95P280X145-6N (TSOP, 6-Leads, Body 3.0x1.8mm (max), Pitch 0.95mm, IPC Medium Density)
footprint TSOP65P210X110-6N (TSOP, 6-Leads, Body 2.2x1.4mm (max), Pitch 0.65mm, IPC Medium Density)
pins: 1 VCCA (power), 2 GND (power), 3 A (hiz), 4 B (hiz), 5 DIR (hiz), 6 VCCB (power)

## Socket 2 Pin
designator P?
Power Input
footprint 2pin
pins: 1, 2

## Socket 3 Pin
designator P?  (value not drawn)
Power Input
footprint 3PIN
pins: 1, 2, 3

## Socket 4 Pin
designator P?  (value not drawn)
Power Input
footprint 4pin
pins: 1, 2, 3, 4

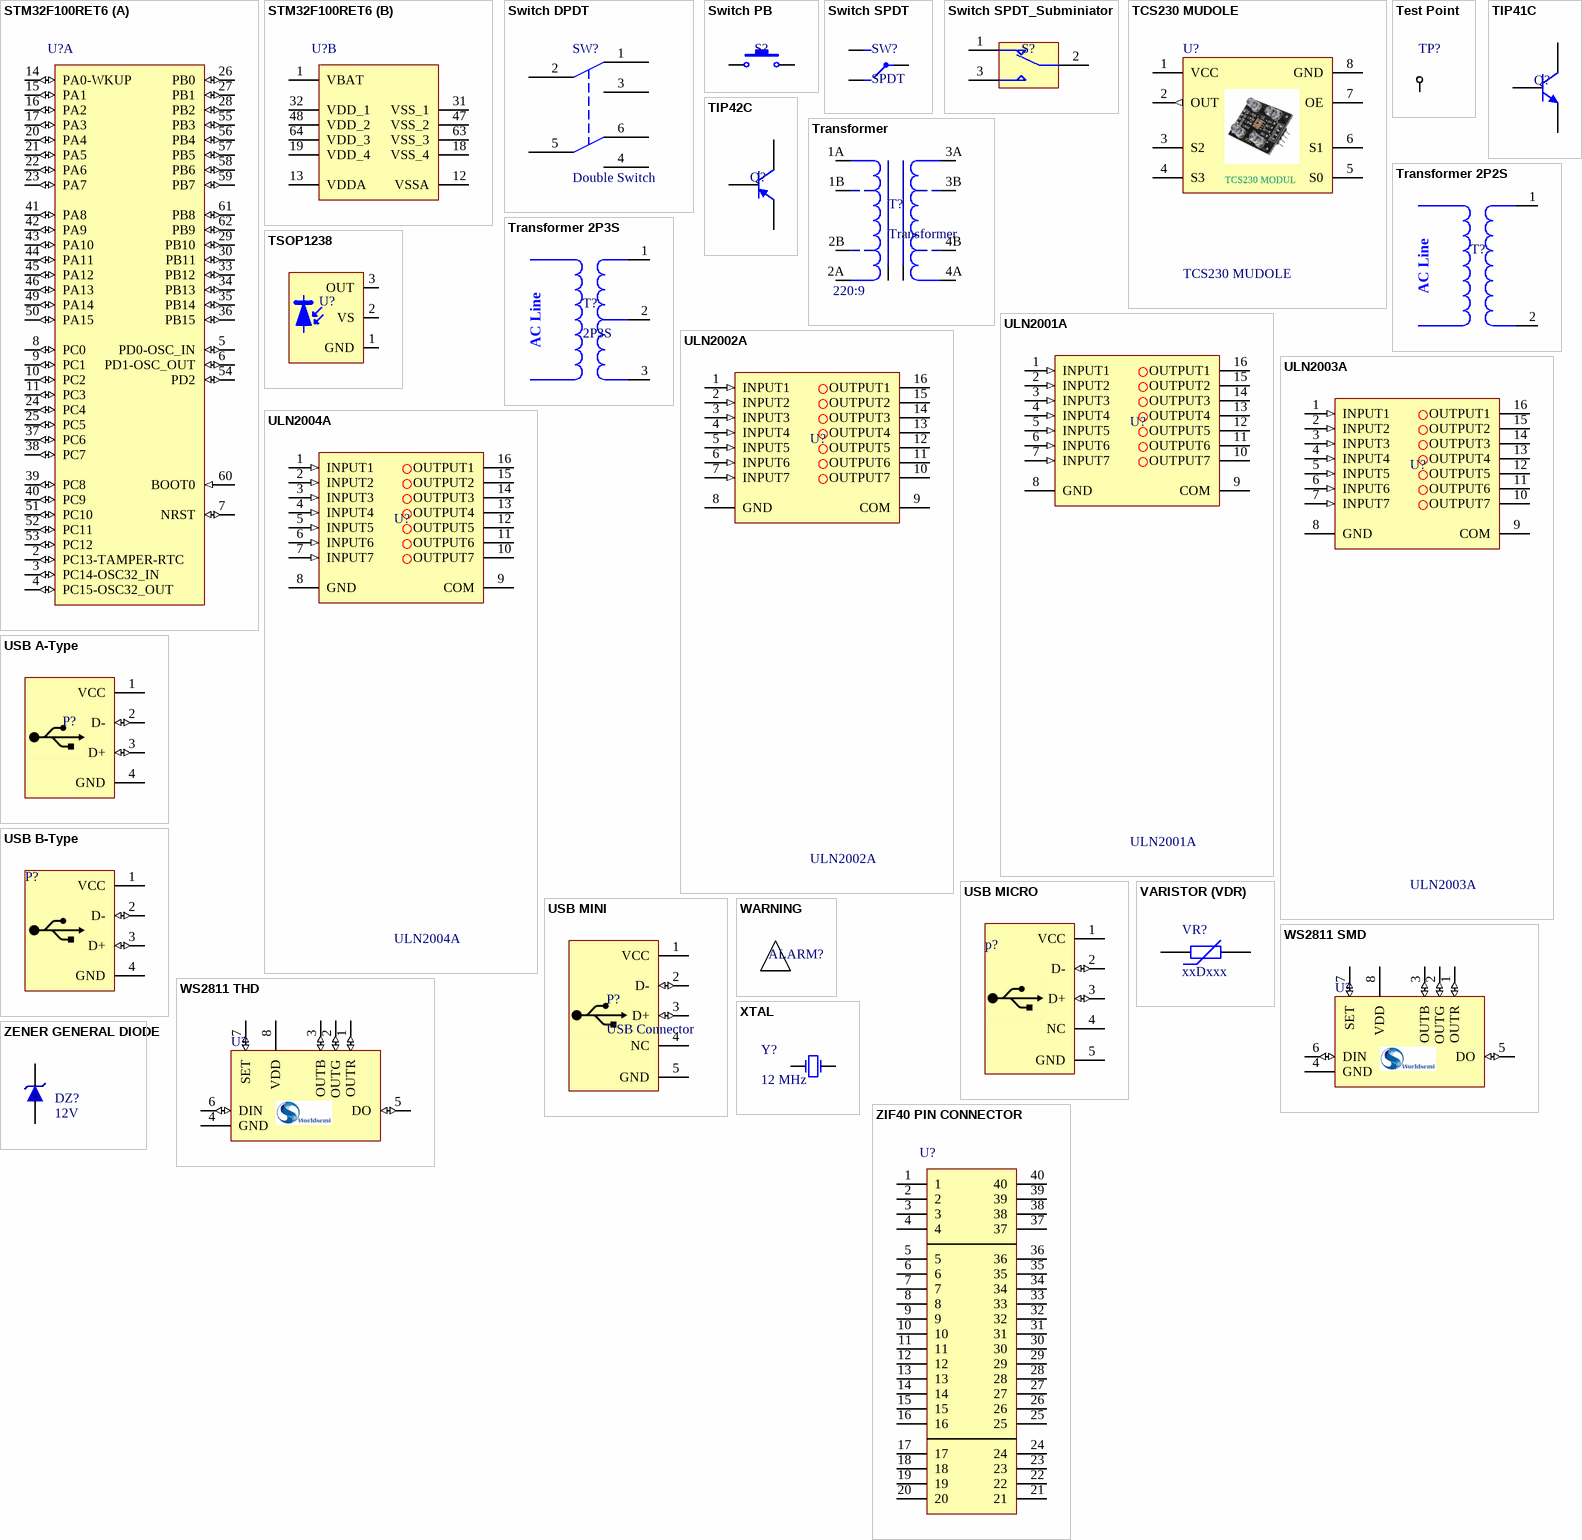
[diagram p7: symbols STM32F100RET6 to ZIF40 PIN CONNECTOR]

## STM32F100RET6
designator U?
ARM Cortex-M3 32-bit MCU, 512 KB Flash, 32 KB Internal RAM, 51 I/Os, 64-pin LQFP, -40 to 85 degC, Tray; PartNumber: STM32F100RET6; A/D Converter: 1x12-bit (16 Channel); D/A Converter: 2x12-bit (2 Channel); FLASH Size (Prog) (kB): 512; I/Os (High Current): 51; Internal RAM Size (kB): 32; Operating Frequency(F) (Processor speed) (MHz): 24; Supply Voltage(Vcc) min (V): 2; DatasheetVersion: Rev. 7; PackageVersion: Rev. 4, 06/2013; PackageReference: LQFP64; PackageDescription: 64-Pin Low Profile Quad Flat Package, 10 x 10 mm Body, 0.5 mm Pitch; Supplier 1: Mouser; Supplier Part Number 1: N/A; Core: ARM Cortex-M3; Packing: Tray; Mounting Technology: Surface Mount; ComponentLink1Description: Manufacturer URL; ComponentLink1URL: http://www.st.com/web/en/home.html; ComponentLink2Description: Datasheet; ComponentLink2URL: http://www.st.com/st-web-ui/static/active/en/resource/technical/document/datasheet/CD00212417.pdf; ComponentLink3Description: Package Specification; ComponentLink3URL: http://www.st.com/st-web-ui/static/active/en/resource/technical/document/datasheet/DM00037051.pdf
footprint LQFP64_N (Thin QFP, 64-Leads, Body 10x10mm, Pitch 0.5mm, IPC Medium Density)
footprint LQFP64_L (Thin QFP, 64-Leads, Body 10x10mm, Pitch 0.5mm, IPC High Density)
footprint LQFP64_M (Thin QFP, 64-Leads, Body 10x10mm, Pitch 0.5mm, IPC Low Density)
footprint LQFP64_V (Thin QFP, 64-Leads, Body 10x10mm, Pitch 0.5mm, ST Recommended)
part A pins: 2 PC13-TAMPER-RTC (io) "PC13-TAMPER-RTC/PC13/TAMPER-RTC", 3 PC14-OSC32_IN (io) "PC14-OSC32_IN/PC14/OSC32_IN", 4 PC15-OSC32_OUT (io) "PC15-OSC32_OUT/PC15/OSC32_OUT", 5 PD0-OSC_IN (io) "PD0/OSC_IN", 6 PD1-OSC_OUT (io) "PD1/OSC_OUT", 7 NRST (io), 8 PC0 (io) "PC0/ADC_IN10", 9 PC1 (io) "PC1/ADC_IN11", 10 PC2 (io) "PC2/ADC_IN12", 11 PC3 (io) "PC3/ADC_IN13", 14 PA0-WKUP (io) "PA0-WKUP/PA0/WKUP/USART2_CTS/ADC_IN0/TIM2_CH1_ETR/TIM5_CH1", 15 PA1 (io) "PA1/USART2_RTS/ADC_IN1/TIM5_CH2/TIM2_CH2", 16 PA2 (io) "PA2/USART2_TX/TIM5_CH3/ADC_IN2/TIM15_CH1/TIM2_CH3", 17 PA3 (io) "PA3/USART2_RX/TIM5_CH4/ADC_IN3/TIM2_CH4/TIM15_CH2", 20 PA4 (io) "PA4/SPI1_NSS/USART2_CK/DAC_OUT1/ADC_IN4", 21 PA5 (io) "PA5/SPI1_SCK/DAC_OUT2/ADC_IN5", 22 PA6 (io) "PA6/SPI1_MISO/ADC_IN6/TIM3_CH1/TIM1_BKIN/TIM16_CH1", 23 PA7 (io) "PA7/SPI1_MOSI/ADC_IN7/TIM3_CH2/TIM1_CH1N/TIM17_CH1", 24 PC4 (io) "PC4/ADC_IN14/TIM12_CH1", 25 PC5 (io) "PC5/ADC_IN15/TIM12_CH2", 26 PB0 (io) "PB0/ADC_IN8/TIM3_CH3/TIM1_CH2N/TIM13_CH1", 27 PB1 (io) "PB1/ADC_IN9/TIM3_CH4/TIM1_CH3N/TIM14_CH1", 28 PB2 (io) "PB2/BOOT1", 29 PB10 (io) "PB10/I2C2_SCL/USART3_TX/TIM2_CH3/HDMI_CEC", 30 PB11 (io) "PB11/I2C2_SDA/USART3_RX/TIM2_CH4", 33 PB12 (io) "PB12/SPI2_NSS/I2C2_SMBA/USART3_CK/TIM1_BKIN/TIM12_CH1", 34 PB13 (io) "PB13/SPI2_SCK/USART3_CTS/TIM1_CH1N/TIM12_CH2", 35 PB14 (io) "PB14/SPI2_MISO/TIM1_CH2N/USART3_RTS/TIM15_CH1", 36 PB15 (io) "PB15/SPI2_MOSI/TIM1_CH3N/TIM15_CH1N/TIM15_CH2", 37 PC6 (io) "PC6/TIM3_CH1", 38 PC7 (io) "PC7/TIM3_CH2", 39 PC8 (io) "PC8/TIM13_CH1/TIM3_CH3", 40 PC9 (io) "PC9/TIM14_CH1/TIM3_CH4", 41 PA8 (io) "PA8/USART1_CK/TIM1_CH1/MCO", 42 PA9 (io) "PA9/USART1_TX/TIM1_CH2/TIM15_BKIN", 43 PA10 (io) "PA10/USART1_RX/TIM1_CH3/TIM17_BKIN", 44 PA11 (io) "PA11/USART1_CTS/TIM1_CH4", 45 PA12 (io) "PA12/USART1_RTS/TIM1_ETR", 46 PA13 (io) "PA13/JTMS-SWDIO", 49 PA14 (io) "PA14/JTCK-SWCLK", 50 PA15 (io) "PA15/JTDI/SPI3_NSS/TIM2_CH1_ETR/SPI1_NSS", 51 PC10 (io) "PC10/UART4_TX/USART3_TX", 52 PC11 (io) "PC11/UART4_RX/USART3_RX", 53 PC12 (io) "PC12/UART5_TX/USART3_CK", 54 PD2 (io) "PD2/TIM3_ETR/UART5_RX", 55 PB3 (io) "PB3/JTDO/SPI3_SCK/TRACESWO/TIM2_CH2/SPI1_SCK", 56 PB4 (io) "PB4/NJTRST/SPI3_MISO/TIM3_CH1/SPI1_MISO", 57 PB5 (io) "PB5/I2C1_SMBA/SPI3_MOSI/TIM16_BKIN/TIM3_CH2/SPI1_MOSI", 58 PB6 (io) "PB6/I2C1_SCL/TIM4_CH1/TIM16_CH1N/USART1_TX", 59 PB7 (io) "PB7/I2C1_SDA/TIM4_CH2/TIM17_CH1N/USART1_RX", 60 BOOT0 (in), 61 PB8 (io) "PB8/TIM4_CH3/TIM16_CH1/HDMI_CEC/I2C1_SCL", 62 PB9 (io) "PB9/TIM4_CH4/TIM17_CH1/I2C1_SDA"
part B pins: 1 VBAT (power), 12 VSSA (power), 13 VDDA (power), 18 VSS_4 (power), 19 VDD_4 (power), 31 VSS_1 (power), 32 VDD_1 (power), 47 VSS_2 (power), 48 VDD_2 (power), 63 VSS_3 (power), 64 VDD_3 (power)

## Switch DPDT
designator SW?, comment Double Switch
DPDT Switch
footprint Switch - DPDT
footprint HDR2x3 (Connector; Header; 3x2 Position)
pins: 1, 2, 3, 4, 5, 6

## Switch PB
designator S?  (value not drawn)
Push Button Switch
footprint Switch - Push to On
footprint SW-PB
pins: 1, 2

## Switch SPDT
designator SW?, comment SPDT
SPDT Switch; Designer: Saeid Jorablo; Company: ControTEK; Adding Date: 1387/01/10
footprint SW SPDT- Horizontal
footprint Switch SPDT - 500x270x1100x185 mil
footprint Switch SPDT - 500x270x1100x185 mil - Right Angle
pins: 1, 2, 3

## Switch SPDT_Subminiator
designator S?  (value not drawn)
Subminiator SPDT Switch; Company: E.P.I.L; Design date: 2011/11/02
footprint SPDT Subminiator (Subminiator SPDT switch)
pins: 1, 2, 3

## TCS230 MUDOLE
designator U?
COLOR LIGHT-TO-FREQUENCY CONVERTER; Published: 2017-2-23; DatasheetVersion: http://www.roboeq.ir/files/id/2049/name/tcs230.pdf/; PackageVersion: Low-profile surface mount package; Publisher: Abbas Basereh; PackageDescription: COLOR LIGHT-TO-FREQUENCY CONVERTER; Supplier 1: http://shop.aftabrayaneh.com/Color_Sensor_Tcs230__AFTAB.html?search=TCS; Supplier Part Number 1: TCS230 MUDOLE; Supplier 2: http://shop.aftabrayaneh.com/Color_Sensor_Tcs230__AFTAB.html?search=TCS; ComponentLink1Description: Manufacturer Link; ComponentLink1URL: http://www.roboeq.ir/files/id/2049/name/tcs230.pdf/
footprint TCS230 MODULE (DESIGNER ABBAS BASEREH)
pins: 1 VCC (power), 2 OUT (out), 3 S2, 4 S3, 5 S0, 6 S1, 7 OE, 8 GND (power)
text: TCS230 MODUL

## Test Point
designator TP?  (value not drawn)
Test Point; Description: *
footprint Test Point
footprint Test Point Small
footprint Test Point SMD
pins: 1 T

## TIP41C
designator Q?  (value not drawn)
NPN  power transistor; Manufacturer: STMicroelectronics; Designer: Abbas Basereh; DESC.: Complementary power transistors; Link: https://www.aliexpress.com/item/; Link: http://www.tme.eu/en/; Link: http://www.digikey.com/; Part. No: TIP41C
footprint TO-220 AB WITH HEAT SINK (Epoxy meets UL94, V0)
footprint TO-220 AB (Epoxy meets UL94, V0)
footprint TO-220 AB S (Epoxy meets UL94, V0)
footprint TO-220 AB WITH HEAT SINK ASM
footprint TO-220 AB with heatsink ya25 (Epoxy meets UL94, V0-Design:Abbas Basereh)
pins: 1 B, 2 C, 3 E

## TIP42C
designator Q?  (value not drawn)
PNP  power transistor; Manufacturer: STMicroelectronics; Designer: Abbas Basereh; DESC.: Complementary power transistors; Link: https://www.aliexpress.com/item/; Link: http://www.tme.eu/en/; Link: http://www.digikey.com/; Part. No: TIP42C
footprint TO-220 AB WITH HEAT SINK (Epoxy meets UL94, V0)
footprint TO-220 AB (Epoxy meets UL94, V0)
footprint TO-220 AB S (Epoxy meets UL94, V0)
footprint TO-220 AB WITH HEAT SINK ASM
footprint TO-220 AB with heatsink ya25 (Epoxy meets UL94, V0-Design:Abbas Basereh)
pins: 1 B, 2 C, 3 E

## Transformer
designator T?  Voltage Ratio: 220:9
Transformer 4 Primary , 4 Secondry; Company: DASE CO; Power: 100W; Adding Date: 10/27/2010
footprint Trans- Small
pins: 1A, 1B, 2A, 2B, 3A, 3B, 4A, 4B, SA, SB

## Transformer 2P2S
designator T?, comment 2P2S  (value not drawn)
Transformer 2 Primary , 2 Secondry; Company: ControTEK; Voltage Ratio: 220:9; Power: 100W; Adding Date: 1387/01/22
pins: 1, 2
text: AC Line

## Transformer 2P3S
designator T?, comment 2P3S
Transformer 2 Primary , 3 Secondry; Designer: Saeid Jorablo; Company: ControTEK; Voltage Ratio: 220:9; Power: 72W; Adding Date: 1387/01/22
pins: 1, 2, 3
text: AC Line

## TSOP1238
designator U?  (value not drawn)
Photo Modules for PCM Remote Control Systems; Frequency: 38 KHz; Designer: Saeid Jorablo; Company: IPA CO; Voltage: 5 V; Power: 50 mW; Adding Date: 1388/04/06
footprint TSOP1238 (IR Sensor (TV Sensor))
pins: 1 GND, 2 VS, 3 OUT

## ULN2001A
designator U?
SEVEN DARLINGTON ARRAYS; Published: 2017-3-2; DatasheetVersion: STMicroelectronics GROUP OF COMPANIES; PackageVersion: 2017-3-2; PackageReference: SO16_N; Publisher: Abbas Basereh; PackageDescription: 16-Pin Small Outline Integrated Circuit 1.27 mm Pitch, IPC High Density; Supplier 1: Digi-Key; Supplier Part Number 1: ULN2001A; Supplier 2: Mouser; Supplier Part Number 2: ULN2001A; ComponentLink1Description: Datasheet; ComponentLink2URL: http://www.st.com
footprint SO16_L (16-Pin Small Outline Integrated Circuit 1.27 mm Pitch, IPC High Density - DESIGNER ABBAS BASEREH)
footprint SO16_M (16-Pin Small Outline Integrated Circuit 1.27 mm Pitch, IPC Low Density - DESIGNER ABBAS BASEREH)
footprint SO16_N (16-Pin Small Outline Integrated Circuit 1.27 mm Pitch, IPC Medium Density - DESIGNER ABBAS BASEREH)
pins: 1 INPUT1 (in), 2 INPUT2 (in), 3 INPUT3 (in), 4 INPUT4 (in), 5 INPUT5 (in), 6 INPUT6 (in), 7 INPUT7 (in), 8 GND (power), 9 COM (power), 10 OUTPUT7, 11 OUTPUT6, 12 OUTPUT5, 13 OUTPUT4, 14 OUTPUT3, 15 OUTPUT2, 16 OUTPUT1

## ULN2002A
designator U?
SEVEN DARLINGTON ARRAYS; Published: 2017-3-2; DatasheetVersion: STMicroelectronics GROUP OF COMPANIES; PackageVersion: 2017-3-2; PackageReference: SO16_N; Publisher: Abbas Basereh; PackageDescription: 16-Pin Small Outline Integrated Circuit 1.27 mm Pitch, IPC High Density; Supplier 1: Digi-Key; Supplier Part Number 1: ULN2002A; Supplier 2: Mouser; Supplier Part Number 2: ULN2002A; ComponentLink1Description: Datasheet; ComponentLink2URL: http://www.st.com
footprint SO16_L (16-Pin Small Outline Integrated Circuit 1.27 mm Pitch, IPC High Density - DESIGNER ABBAS BASEREH)
footprint SO16_M (16-Pin Small Outline Integrated Circuit 1.27 mm Pitch, IPC Low Density - DESIGNER ABBAS BASEREH)
footprint SO16_N (16-Pin Small Outline Integrated Circuit 1.27 mm Pitch, IPC Medium Density - DESIGNER ABBAS BASEREH)
pins: 1 INPUT1 (in), 2 INPUT2 (in), 3 INPUT3 (in), 4 INPUT4 (in), 5 INPUT5 (in), 6 INPUT6 (in), 7 INPUT7 (in), 8 GND (power), 9 COM (power), 10 OUTPUT7, 11 OUTPUT6, 12 OUTPUT5, 13 OUTPUT4, 14 OUTPUT3, 15 OUTPUT2, 16 OUTPUT1

## ULN2003A
designator U?
SEVEN DARLINGTON ARRAYS; Published: 2017-3-2; DatasheetVersion: STMicroelectronics GROUP OF COMPANIES; PackageVersion: 2017-3-2; PackageReference: SO16_N; Publisher: Abbas Basereh; PackageDescription: 16-Pin Small Outline Integrated Circuit 1.27 mm Pitch, IPC High Density; Supplier 1: Digi-Key; Supplier Part Number 1: ULN2003A; Supplier 2: Mouser; Supplier Part Number 2: ULN2003A; ComponentLink1Description: Datasheet; ComponentLink2URL: http://www.st.com
footprint SO16_L (16-Pin Small Outline Integrated Circuit 1.27 mm Pitch, IPC High Density - DESIGNER ABBAS BASEREH)
footprint SO16_M (16-Pin Small Outline Integrated Circuit 1.27 mm Pitch, IPC Low Density - DESIGNER ABBAS BASEREH)
footprint SO16_N (16-Pin Small Outline Integrated Circuit 1.27 mm Pitch, IPC Medium Density - DESIGNER ABBAS BASEREH)
pins: 1 INPUT1 (in), 2 INPUT2 (in), 3 INPUT3 (in), 4 INPUT4 (in), 5 INPUT5 (in), 6 INPUT6 (in), 7 INPUT7 (in), 8 GND (power), 9 COM (power), 10 OUTPUT7, 11 OUTPUT6, 12 OUTPUT5, 13 OUTPUT4, 14 OUTPUT3, 15 OUTPUT2, 16 OUTPUT1

## ULN2004A
designator U?
SEVEN DARLINGTON ARRAYS; Published: 2017-3-2; DatasheetVersion: STMicroelectronics GROUP OF COMPANIES; PackageVersion: 2017-3-2; PackageReference: SO16_N; Publisher: Abbas Basereh; PackageDescription: 16-Pin Small Outline Integrated Circuit 1.27 mm Pitch, IPC High Density; Supplier 1: Digi-Key; Supplier Part Number 1: ULN2004A; Supplier 2: Mouser; Supplier Part Number 2: ULN2004A; ComponentLink1Description: Datasheet; ComponentLink2URL: http://www.st.com
footprint SO16_L (16-Pin Small Outline Integrated Circuit 1.27 mm Pitch, IPC High Density - DESIGNER ABBAS BASEREH)
footprint SO16_M (16-Pin Small Outline Integrated Circuit 1.27 mm Pitch, IPC Low Density - DESIGNER ABBAS BASEREH)
footprint SO16_N (16-Pin Small Outline Integrated Circuit 1.27 mm Pitch, IPC Medium Density - DESIGNER ABBAS BASEREH)
pins: 1 INPUT1 (in), 2 INPUT2 (in), 3 INPUT3 (in), 4 INPUT4 (in), 5 INPUT5 (in), 6 INPUT6 (in), 7 INPUT7 (in), 8 GND (power), 9 COM (power), 10 OUTPUT7, 11 OUTPUT6, 12 OUTPUT5, 13 OUTPUT4, 14 OUTPUT3, 15 OUTPUT2, 16 OUTPUT1

## USB A-Type
designator P?, comment USB Connector  (value not drawn)
USB Connector-A Type
footprint USB2.5-2V4A (Connector; USB1.1, Type A, Thru-Hole; 4 Position; Vertical)
footprint USB2.5-2H4C (Connector; USB1.1, Type A, Thru-Hole; 4 Position; Right Angle)
footprint USB2.5-4H8B (Connector; USB1.1, Type A, Thru-Hole; 4x4 Position; Right Angle)
footprint USB A TYPE Right Angle (Connector; USB1.1, Type A, SM; 4 Position; Right Angle DESIGNER ABBAS BASEREH)
footprint USB2.0-4H4 (Connector; USB1.1, Type A, Thru-Hole; 4 Position; Right Angle DESIGNER ABBAS BASEREH)
footprint USB/SM2.5-4H4 (Connector; USB1.1, Type A, SM; 4 Position; Right Angle DESIGNER ABBAS BASEREH)
footprint USB/SM2.5-4H4A (Connector; USB1.1, Type A, SM; 4 Position; Right Angle)
pins: 1 VCC (power), 2 D- (io), 3 D+ (io), 4 GND (power)

## USB B-Type
designator P?, comment USB Connector  (value not drawn)
USB Connector-B Type; Adding Date: 10/26/2010
footprint USB2.5-2H4D (Connector; USB1.1, Type B, Thru-Hole; 4 Position; Right Angle)
footprint USB2.5-2H4E (Connector; USB1.1, Type B, Thru-Hole; 4 Position; Right Angle)
footprint USB2.5-2H4F (Connector; USB1.1, Type B, Thru-Hole; 4 Position; Right Angle)
footprint USB2.5-2H4G (Connector; USB1.1, Type B, Thru-Hole; 4 Position; Right Angle)
footprint USB2.5-2V4 (Connector; USB1.1, Type B, Thru-Hole; 4 Position; Vertical)
footprint USB2.5-4V4 (Connector; USB1.1, Type B, Thru-Hole; 4 Position; Vertical)
footprint USB/SM1.25-4H4 (Connector; USB1.1, Type B, SM; 4 Position; Right Angle)
pins: 1 VCC (power), 2 D- (io), 3 D+ (io), 4 GND (power)

## USB MICRO
designator p?, comment USB Connector  (value not drawn)
USB Connector MICRO-B Type; Designer: ABBAS BASEREH; Max Current: 1600mA; Mounting Technology: Surface Mount\Through-Hole; Category: Connector; Pin Count: 5-7; Publisher: ABBAS BASEREH; Status: Unreleased; ComponentLink1Description: Datasheet; ComponentLink2Description: Reference; Update: 1395-11-17
footprint USB_AB_BM_SHS (USB Micro AB - Standard (Bottom mount), Shell SMT DESIGNER ABBAS BASEREH)
footprint USB_AB_receptacle (USB Micro AB - receptacle  DESIGNER ABBAS BASEREH)
pins: 1 VCC (power), 2 D- (io), 3 D+ (io), 4 NC, 5 GND (power)
3 alternate drawings of the same symbol

## USB MINI
designator P?, comment USB Connector
USB Connector MINI-AB Type
footprint mini USB 2
footprint Mini USB
footprint USB/SM0.8-6H5 (Connector; USB2.0, Type B, SM; 5 Position; Right Angle)
pins: 1 VCC (power), 2 D- (io), 3 D+ (io), 4 NC, 5 GND (power)

## VARISTOR (VDR)
designator VR?, comment xxDxxx
VARISTORS; Manufacturer: china-canada-philipina; DESCRIPTION: Metal Oxide Varistor Total Size; Designer: Abbas Basereh; Models: MOV-VDR-COV; Data: 2017-1-5; Link: digikey.com; VALUE: xxDxxx; PUBLISHER: ABBAS BASEREH
footprint 05D XXX (MOV-05DxxxK Metal Oxide Varistors (MOVs) are 5 mm-Design:Abbas Basereh)
footprint 07D XXX (MOV-07DxxxK Metal Oxide Varistors (MOVs) are 7 mm-Design:Abbas Basereh)
footprint 10D XXX (MOV-10DxxxK Metal Oxide Varistors (MOVs) are 10 mm-Design:Abbas Basereh)
footprint 14D XXX (MOV-14DxxxK Metal Oxide Varistors (MOVs) are 14 mm-Design:Abbas Basereh)
footprint 20D XXX (MOV-20DxxxK Metal Oxide Varistors (MOVs) are 20 mm-Design:Abbas Basereh)
footprint 23D XXX (MOV-23DxxxK Metal Oxide Varistors (MOVs) are 23 mm-Design:Abbas Basereh)
pins: 1, 2

## WARNING
designator ALARM?, comment Warning!  (value not drawn)  (no BOM)
Alarm Logo; Company: E.P.I.L; Design Date: 11/6/2011; Value: Warning!
footprint LOGO SPEAKER
footprint LOGO USB
footprint LOGO ALARM
footprint LOGO ESD
footprint LOGO RESET
footprint LOGO Saeid

## WS2811 SMD
designator U?
LED Driver IC 3 Output Linear 18.5mA Module 10PK; ComponentAvailability: Not recommended for new design.; Published: 2017-1-30; DatasheetVersion: 30-1-2017; PackageVersion: 30-1-2017; PackageReference: 8S2; Publisher: Abbas Basereh; PackageDescription: SOP-8; Supplier 1: Digi-Key; Supplier Part Number 1: WS2811; Supplier 2: Farnell; Supplier Part Number 2: 1378; Supplier 3: Mouser; Supplier Part Number 3: 1528-1537-ND; ComponentLink1Description: LED Driver IC 3 Output Linear 18.5mA Module 10PK; ComponentLink1URL: http://www.world-semi.com; ComponentLink2Description: WS2811; ComponentLink3Description: WS2811; ComponentLink4Description: http://www.world-semi.com
footprint 8S2_N (SOP, 8-Leads, Body 5.3x5.3mm, Pitch 1.27mm, IPC Medium Density)
footprint 8S2_L (SOP, 8-Leads, Body 5.3x5.3mm, Pitch 1.27mm, IPC High Density)
footprint 8S2_M (SOP, 8-Leads, Body 5.3x5.3mm, Pitch 1.27mm, IPC Low Density)
pins: 1 OUTR (io), 2 OUTG (io), 3 OUTB (io), 4 GND (power), 5 DO (io), 6 DIN (io), 7 SET (io), 8 VDD (power)

## WS2811 THD
designator U?
LED Driver IC 3 Output Linear 18.5mA Module 10PK; ComponentAvailability: Not recommended for new design.; Published: 2017-1-30; DatasheetVersion: 30-1-2017; PackageVersion: 30-1-2017; PackageReference: 8P3; Publisher: Abbas Basereh; PackageDescription: DIP-8; Supplier 1: Digi-Key; Supplier Part Number 1: WS2811; Supplier 2: Farnell; Supplier 3: Mouser; ComponentLink1Description: LED Driver IC 3 Output Linear 18.5mA Module 10PK; ComponentLink1URL: http://www.world-semi.com; ComponentLink2Description: WS2811; ComponentLink3Description: WS2811; ComponentLink4Description: http://www.world-semi.com
footprint 8P3 (DIP, 8-Leads, Row Spacing 7.62mm, Pitch 2.54mm, Body 9.59x6.61mm)
pins: 1 OUTR (io), 2 OUTG (io), 3 OUTB (io), 4 GND (power), 5 DO (io), 6 DIN (io), 7 SET (io), 8 VDD (power)

## XTAL
designator Y?, comment 12 MHz
XTAL Crystal; Designer: ABBAS BASEREH; Design Date: 2017-1-3; ComponentLink1Description: Datasheet; ComponentLink2Description: Reference; Mounting Technology: Surface Mount\Through-Hole; Value: 12 MHz; Status: Unreleased
footprint CRYSTAL Small (DESIGNER ABBAS BASEREH)
footprint Crystal SMD (DESIGNER ABBAS BASEREH)
footprint XTAL 16MHZ (Crystal Oscillator)
footprint XTAL L (Crystal Oscillator)
footprint XTAL M (Crystal Oscillator)
footprint XTAL RTC (Crystal Oscillator)
pins: 1 OSC1, 2 OSC2

## ZENER GENERAL DIODE
designator DZ?, comment 12V
DIODE ZENER GENERAL; Published: 2017-1-12; PackageVersion: 2017-1-12; PackageReference: DO 35; Publisher: Abbas Basereh; PackageDescription: DIODE GEN ZENER; ComponentLink1Description: Manufacturer Link; ComponentLink2Description: Datasheet; VALUE: 12V
footprint DO 35 (Diode)
footprint SOD323 (SOD-323; 2 Leads; Body 1.8 x 1.35 mm, (LxW))
footprint SOD80, LL-34 (Diode, MiniMELF)
footprint SOD123 (SOD-123; 2 Leads; Body 2.7 x 1.6 mm, (LxW))
pins: 1, 2